# Altium footprint library AD.PcbLib: 13 footprints
Each footprint in its own frame and in the unit in brackets; x right, y up, seen from the top. Pads: shape width x height; smd on the part's side, far side on the other; paste and mask are expansions set on the pad; w line width, h text height; cw(c..) or ccw(c..) is an arc to the next point about the centre after c.
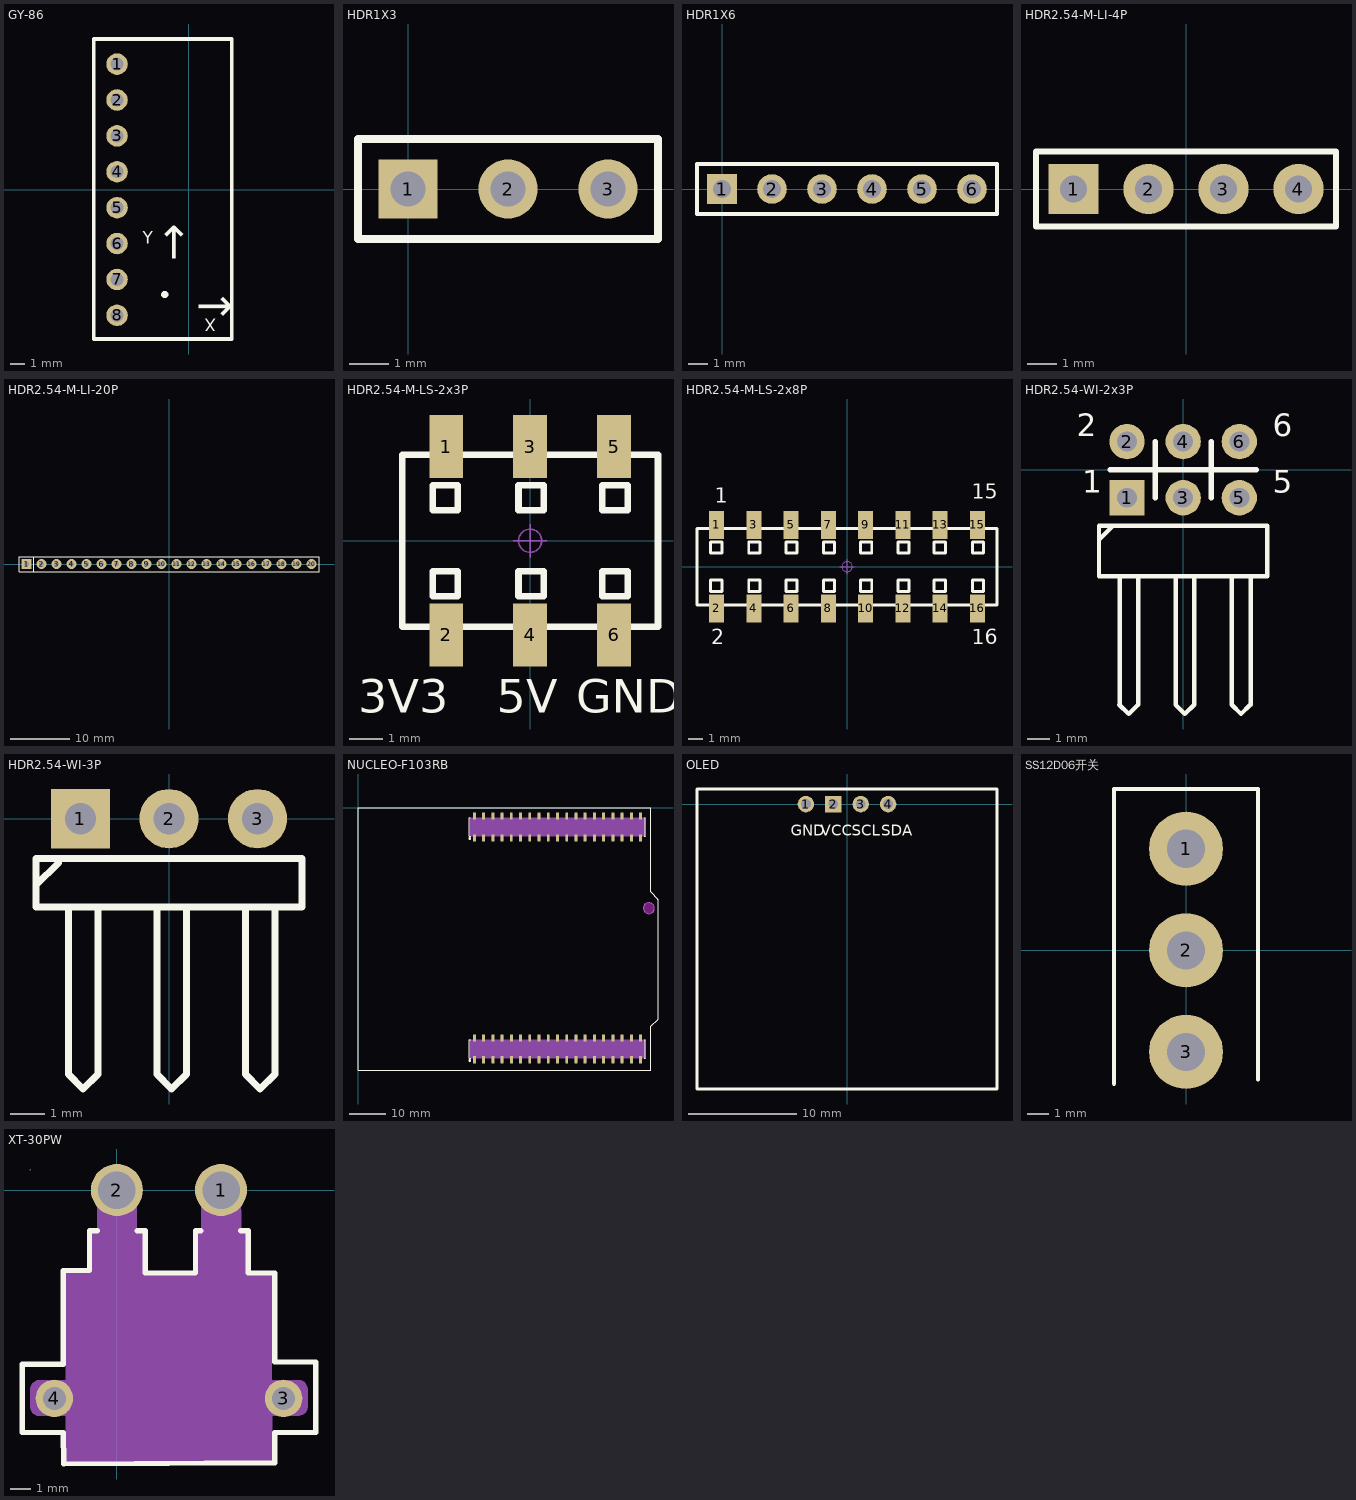
[diagram p0: the footprints below, top view; thin cyan lines are the x and y axes]

## GY-86 [mil]
pads (8):
  round 60 hole 36: 1(-200,350) 2(-200,250) 3(-200,150) 4(-200,50) 5(-200,-50) 6(-200,-150) 7(-200,-250) 8(-200,-350)
Top Overlay:
  circle w10: c-67,-292 r5
  lines w10: -265,-415.98 120,-415.98 120,420 -265,420 -265,-415.98
  text "↑" at -2.95,-273.22 h157.48
  text "X" at 77.05,-347 h59.05
  text "↑" at -92.95,-223.22 h157.48
  text "Y" at -127.95,-163.22 h59.05

## HDR1X3 [mm] "Connector; Header; 3 Position"
pads (3):
  rect 1.5x1.5 hole 0.9: 1(0,0)
  round 1.5 hole 0.9: 2(2.54,0) 3(5.08,0)
Top Overlay:
  lines w0.2: -1.27,-1.27 6.35,-1.27 6.35,1.27 -1.27,1.27 -1.27,-1.27
3D body "HDR2.54-1P_M.STEP": height 8.5, standoff -3, extent 3.81,-1.27 6.35,1.27
3D body "HDR2.54-1P_M.STEP": height 8.5, standoff -3, extent 1.27,-1.27 3.81,1.27
3D body "HDR2.54-1P_M.STEP": height 8.5, standoff -3, extent -1.27,-1.27 1.27,1.27

## HDR1X6 [mm] "Connector; Header; 6 Position"
pads (6):
  rect 1.5x1.5 hole 0.9: 1(0,0)
  round 1.5 hole 0.9: 2(2.54,0) 3(5.08,0) 4(7.62,0) 5(10.16,0) 6(12.7,0)
Top Overlay:
  lines w0.2: -1.27,-1.27 -1.27,1.27 13.97,1.27 13.97,-1.27 -1.27,-1.27
3D body "HDR2.54-1P_M.STEP": height 8.5, standoff -3, extent 11.43,-1.27 13.97,1.27
3D body "HDR2.54-1P_M.STEP": height 8.5, standoff -3, extent 8.89,-1.27 11.43,1.27
3D body "HDR2.54-1P_M.STEP": height 8.5, standoff -3, extent 6.35,-1.27 8.89,1.27
3D body "HDR2.54-1P_M.STEP": height 8.5, standoff -3, extent 3.81,-1.27 6.35,1.27
3D body "HDR2.54-1P_M.STEP": height 8.5, standoff -3, extent 1.27,-1.27 3.81,1.27
3D body "HDR2.54-1P_M.STEP": height 8.5, standoff -3, extent -1.27,-1.27 1.27,1.27

## HDR2.54-M-LI-4P [mm] "排母，4脚"
pads (4):
  rect 1.7x1.7 hole 0.9: 1(-3.81,0)
  round 1.7 hole 0.9: 2(-1.27,0) 3(1.27,0) 4(3.81,0)
Top Overlay:
  lines w0.2: -5.08,-1.27 5.08,-1.27 5.08,1.27 -5.08,1.27 -5.08,-1.27
3D body "HDR2.54-1P_M.STEP": height 8.5, standoff -3, extent 0,-1.27 2.54,1.27
3D body "HDR2.54-1P_M.STEP": height 8.5, standoff -3, extent 2.54,-1.27 5.08,1.27
3D body "HDR2.54-1P_M.STEP": height 8.5, standoff -3, extent -2.54,-1.27 0,1.27
3D body "HDR2.54-1P_M.STEP": height 8.5, standoff -3, extent -5.08,-1.27 -2.54,1.27

## HDR2.54-M-LI-20P [mm] "排母，20脚"
pads (20):
  rect 1.7x1.7 hole 0.9: 1(-24.13,0)
  round 1.7 hole 0.9: 2(-21.59,0) 3(-19.05,0) 4(-16.51,0) 5(-13.97,0) 6(-11.43,0) 7(-8.89,0) 8(-6.35,0) 9(-3.81,0) 10(-1.27,0) 11(1.27,0) 12(3.81,0) 13(6.35,0) 14(8.89,0) 15(11.43,0) 16(13.97,0)
  round 1.7 hole 0.762: 17(16.51,0) 18(19.05,0) 19(21.59,0) 20(24.13,0)
Top Overlay:
  lines w0.2: -22.88,-1.25 -22.88,1.25 ; -25.4,-1.27 -25.4,1.27 -23.495,1.27 25.4,1.27 25.4,-1.27 -25.4,-1.27
3D body "HDR2.54-1P_M.STEP": height 8.5, standoff -3, extent 12.7,-1.27 15.24,1.27
3D body "HDR2.54-1P_M.STEP": height 8.5, standoff -3, extent 15.24,-1.27 17.78,1.27
3D body "HDR2.54-1P_M.STEP": height 8.5, standoff -3, extent 17.78,-1.27 20.32,1.27
3D body "HDR2.54-1P_M.STEP": height 8.5, standoff -3, extent 20.32,-1.27 22.86,1.27
3D body "HDR2.54-1P_M.STEP": height 8.5, standoff -3, extent 22.86,-1.27 25.4,1.27
3D body "HDR2.54-1P_M.STEP": height 8.5, standoff -3, extent 0,-1.27 2.54,1.27
3D body "HDR2.54-1P_M.STEP": height 8.5, standoff -3, extent 2.54,-1.27 5.08,1.27
3D body "HDR2.54-1P_M.STEP": height 8.5, standoff -3, extent 5.08,-1.27 7.62,1.27
3D body "HDR2.54-1P_M.STEP": height 8.5, standoff -3, extent 7.62,-1.27 10.16,1.27
3D body "HDR2.54-1P_M.STEP": height 8.5, standoff -3, extent 10.16,-1.27 12.7,1.27
3D body "HDR2.54-1P_M.STEP": height 8.5, standoff -3, extent -12.7,-1.27 -10.16,1.27
3D body "HDR2.54-1P_M.STEP": height 8.5, standoff -3, extent -10.16,-1.27 -7.62,1.27
3D body "HDR2.54-1P_M.STEP": height 8.5, standoff -3, extent -7.62,-1.27 -5.08,1.27
3D body "HDR2.54-1P_M.STEP": height 8.5, standoff -3, extent -5.08,-1.27 -2.54,1.27
3D body "HDR2.54-1P_M.STEP": height 8.5, standoff -3, extent -2.54,-1.27 0,1.27
3D body "HDR2.54-1P_M.STEP": height 8.5, standoff -3, extent -25.4,-1.27 -22.86,1.27
3D body "HDR2.54-1P_M.STEP": height 8.5, standoff -3, extent -22.86,-1.27 -20.32,1.27
3D body "HDR2.54-1P_M.STEP": height 8.5, standoff -3, extent -20.32,-1.27 -17.78,1.27
3D body "HDR2.54-1P_M.STEP": height 8.5, standoff -3, extent -17.78,-1.27 -15.24,1.27
3D body "HDR2.54-1P_M.STEP": height 8.5, standoff -3, extent -15.24,-1.27 -12.7,1.27

## HDR2.54-M-LS-2x3P [mm] "脚距：2.54mm，贴片双排母"
pads (6):
  rect 1.02x1.9 smd: 1(-2.54,2.85) 2(-2.54,-2.85) 3(0,2.85) 4(0,-2.85) 5(2.54,2.85) 6(2.54,-2.85)
Top Overlay:
  lines w0.2: -3.87,-2.6 -3.87,2.6 3.87,2.6 3.87,-2.6 -3.87,-2.6 ; -2.951,-1.681 -2.951,-0.919 -2.189,-0.919 -2.189,-1.681 -2.951,-1.681 ; -2.951,0.919 -2.951,1.681 -2.189,1.681 -2.189,0.919 -2.951,0.919 ; -0.351,-1.681 -0.351,-0.919 0.411,-0.919 0.411,-1.681 -0.351,-1.681 ; -0.351,0.919 -0.351,1.681 0.411,1.681 0.411,0.919 -0.351,0.919 ; 2.189,-1.681 2.951,-1.681 2.951,-0.919 2.189,-0.919 2.189,-1.681 ; 2.189,0.919 2.951,0.919 2.951,1.681 2.189,1.681 2.189,0.919
  text "GND" at 1.397,-5.207 h1.02
  text "3V3" at -5.207,-5.207 h1.02
  text "5V" at -1.016,-5.207 h1.02
Top Courtyard:
  circle w0.05: c0,0 r0.35
  lines w0.05: -0.5,0 0.5,0 ; 0,-0.5 0,0.5
3D body "HDR2.54 2x1P_M.STEP": height 5.15, standoff 0, extent 1.24,-3.2 3.84,3.2
3D body "HDR2.54 2x1P_M.STEP": height 5.15, standoff 0, extent -1.3,-3.2 1.3,3.2
3D body "HDR2.54 2x1P_M.STEP": height 5.15, standoff 0, extent -3.84,-3.2 -1.24,3.2

## HDR2.54-M-LS-2x8P [mm] "脚距：2.54mm，贴片双排母"
pads (16):
  rect 1.02x1.9 smd: 1(-8.89,2.85) 2(-8.89,-2.85) 3(-6.35,2.85) 4(-6.35,-2.85) 5(-3.81,2.85) 6(-3.81,-2.85) 7(-1.27,2.85) 8(-1.27,-2.85) 9(1.27,2.85) 10(1.27,-2.85) 11(3.81,2.85) 12(3.81,-2.85) 13(6.35,2.85) 14(6.35,-2.85) 15(8.89,2.85) 16(8.89,-2.85)
Top Overlay:
  lines w0.2: -10.23,-2.6 10.22,-2.6 10.22,2.6 -10.23,2.6 -10.23,-2.6 ; -9.301,-1.681 -8.539,-1.681 -8.539,-0.919 -9.301,-0.919 -9.301,-1.681 ; -9.301,0.919 -8.539,0.919 -8.539,1.681 -9.301,1.681 -9.301,0.919 ; -6.701,-1.681 -5.939,-1.681 -5.939,-0.919 -6.701,-0.919 -6.701,-1.681 ; -6.701,0.919 -5.939,0.919 -5.939,1.681 -6.701,1.681 -6.701,0.919 ; -4.161,-1.681 -4.161,-0.919 -3.399,-0.919 -3.399,-1.681 -4.161,-1.681 ; -4.161,0.919 -4.161,1.681 -3.399,1.681 -3.399,0.919 -4.161,0.919 ; -1.621,-1.681 -0.859,-1.681 -0.859,-0.919 -1.621,-0.919 -1.621,-1.681 ; -1.621,0.919 -0.859,0.919 -0.859,1.681 -1.621,1.681 -1.621,0.919 ; 0.919,-1.681 1.681,-1.681 1.681,-0.919 0.919,-0.919 0.919,-1.681 ; 0.919,0.919 1.681,0.919 1.681,1.681 0.919,1.681 0.919,0.919 ; 3.459,-1.681 4.221,-1.681 4.221,-0.919 3.459,-0.919 3.459,-1.681 ; 3.459,0.919 4.221,0.919 4.221,1.681 3.459,1.681 3.459,0.919 ; 5.939,-1.681 5.939,-0.919 6.701,-0.919 6.701,-1.681 5.939,-1.681 ; 5.939,0.919 5.939,1.681 6.701,1.681 6.701,0.919 5.939,0.919 ; 8.539,-1.681 8.539,-0.919 9.301,-0.919 9.301,-1.681 8.539,-1.681 ; 8.539,0.919 8.539,1.681 9.301,1.681 9.301,0.919 8.539,0.919
  text "2" at -9.271,-5.278 h1.02
  text "1" at -9.017,4.374 h1.02
  text "15" at 8.509,4.628 h1.02
  text "16" at 8.509,-5.278 h1.02
Top Courtyard:
  circle w0.05: c0,0 r0.35
  lines w0.05: -0.5,0 0.5,0 ; 0,-0.5 0,0.5
3D body "HDR2.54 2x1P_M.STEP": height 5.15, standoff 0, extent 7.59,-3.2 10.19,3.2
3D body "HDR2.54 2x1P_M.STEP": height 5.15, standoff 0, extent 5.05,-3.2 7.65,3.2
3D body "HDR2.54 2x1P_M.STEP": height 5.15, standoff 0, extent 2.51,-3.2 5.11,3.2
3D body "HDR2.54 2x1P_M.STEP": height 5.15, standoff 0, extent -0.03,-3.2 2.57,3.2
3D body "HDR2.54 2x1P_M.STEP": height 5.15, standoff 0, extent -2.57,-3.2 0.03,3.2
3D body "HDR2.54 2x1P_M.STEP": height 5.15, standoff 0, extent -10.19,-3.2 -7.59,3.2
3D body "HDR2.54 2x1P_M.STEP": height 5.15, standoff 0, extent -7.65,-3.2 -5.05,3.2
3D body "HDR2.54 2x1P_M.STEP": height 5.15, standoff 0, extent -5.11,-3.2 -2.51,3.2

## HDR2.54-WI-2x3P [mm] "双排弯脚排针，3x2脚"
pads (6):
  rect 1.6x1.6 hole 0.9: 1(-2.54,-1.27)
  round 1.6 hole 0.9: 2(-2.54,1.27) 3(0,-1.27) 4(0,1.27) 5(2.54,-1.27) 6(2.54,1.27)
Top Overlay:
  lines w0.2: -3.81,-3.175 -3.175,-2.54 ; -2.888,-10.634 -2.465,-11.057 -2.041,-10.634 -2.032,-10.625 -2.032,-4.826 ; -2.879,-10.634 -2.879,-4.826 ; -0.348,-10.634 0.075,-11.057 0.499,-10.634 ; -0.339,-10.634 -0.339,-4.826 ; 0.508,-10.634 0.508,-4.826 ; 2.192,-10.634 2.615,-11.057 3.039,-10.634 ; 2.201,-10.634 2.201,-4.826 ; 3.048,-10.634 3.048,-4.826 ; -3.81,-4.826 -3.81,-2.54 3.81,-2.54 3.81,-4.826 -3.81,-4.826
  lines w0.254: -3.302,0 3.302,0 ; -1.27,-1.27 -1.27,1.27 ; 1.27,-1.27 1.27,1.27
  text "1" at -4.572,-1.037 h1.02
  text "2" at -4.826,1.503 h1.02
  text "5" at 4.064,-1.037 h1.02
  text "6" at 4.064,1.503 h1.02
Bottom Overlay:
  lines w0.254: -3.302,0 3.302,0 ; -1.27,-1.27 -1.27,1.27 ; 1.27,-1.27 1.27,1.27
3D body "HDR-1x2_H.STEP": height 5.1, standoff -3, extent 1.27,-10.489 3.81,2.361
3D body "HDR-1x2_H.STEP": height 5.1, standoff -3, extent -3.81,-10.489 -1.27,2.361
3D body "HDR-1x2_H.STEP": height 5.1, standoff -3, extent -1.27,-10.489 1.27,2.361

## HDR2.54-WI-3P [mm] "弯脚排针，3脚"
pads (3):
  rect 1.7x1.7 hole 0.9: 1(-2.54,0)
  round 1.7 hole 0.9: 2(0,0) 3(2.54,0)
Top Overlay:
  lines w0.2: -3.81,-1.905 -3.175,-1.27 ; -2.888,-2.54 -2.888,-7.332 -2.465,-7.755 -2.041,-7.332 -2.032,-7.323 ; -2.041,-7.323 -2.041,-2.54 ; -0.348,-2.54 -0.348,-7.332 0.075,-7.755 0.499,-7.332 ; 0.499,-7.323 0.499,-2.54 ; 2.192,-2.54 2.192,-7.332 2.615,-7.755 3.039,-7.332 ; 3.039,-7.323 3.039,-2.54 ; -3.81,-2.54 3.81,-2.54 3.81,-1.143 -2.032,-1.143 -3.81,-1.143 -3.81,-2.54
3D body "HDR2.54-1P_H.STEP": height 4.85, standoff -3, extent -3.81,-7.77 -1.27,1.27
3D body "HDR2.54-1P_H.STEP": height 4.85, standoff -3, extent -1.27,-7.77 1.27,1.27
3D body "HDR2.54-1P_H.STEP": height 4.85, standoff -3, extent 1.27,-7.77 3.81,1.27

## NUCLEO-F103RB [mm]
pads (76):
  rect 0.8x2 smd paste+0 mask+0.051: 1(32,-69.308) 2(32,-63.308) 3(34.54,-69.308) 4(34.54,-63.308) 5(37.08,-69.308) 6(37.08,-63.308) 7(39.62,-69.308) 8(39.62,-63.308) 9(42.16,-69.308) 10(42.16,-63.308) 11(44.7,-69.308) 12(44.7,-63.308) 13(47.24,-69.308) 14(47.24,-63.308) 15(49.78,-69.308) 16(49.78,-63.308) 17(52.32,-69.308) 18(52.32,-63.308) 19(54.86,-69.308) 20(54.86,-63.308) 21(57.4,-69.308) 22(57.4,-63.308) 23(59.94,-69.308) 24(59.94,-63.308) 25(62.48,-69.308) 26(62.48,-63.308) 27(65.02,-69.308) 28(65.02,-63.308) 29(67.56,-69.308) 30(67.56,-63.308) 31(70.1,-69.308) 32(70.1,-63.308) 33(72.64,-69.308) 34(72.64,-63.308) 35(75.18,-69.308) 36(75.18,-63.308) 37(77.72,-69.308) 38(77.72,-63.308) 73(31.995,-8.282) 74(31.995,-2.282) 75(34.535,-8.282) 76(34.535,-2.282) 77(37.075,-8.282) 78(37.075,-2.282) 79(39.615,-8.282) 80(39.615,-2.282) 81(42.155,-8.282) 82(42.155,-2.282) 83(44.695,-8.282) 84(44.695,-2.282) 85(47.235,-8.282) 86(47.235,-2.282) 87(49.775,-8.282) 88(49.775,-2.282) 89(52.315,-8.282) 90(52.315,-2.282) 91(54.855,-8.282) 92(54.855,-2.282) 93(57.395,-8.282) 94(57.395,-2.282) 95(59.935,-8.282) 96(59.935,-2.282) 97(62.475,-8.282) 98(62.475,-2.282) 99(65.015,-8.282) 100(65.015,-2.282) 101(67.555,-8.282) 102(67.555,-2.282) 103(70.095,-8.282) 104(70.095,-2.282) 105(72.635,-8.282) 106(72.635,-2.282) 107(75.175,-8.282) 108(75.175,-2.282) 109(77.715,-8.282) 110(77.715,-2.282)
Top Overlay:
  circle w0.254: c30.73,-69.483 r0.231
  circle w0.254: c30.725,-8.457 r0.231
  lines w0.254: 30.918,-2.782 30.655,-2.782 30.655,-7.782 30.943,-7.782 ; 30.963,-63.808 30.66,-63.808 30.66,-68.808 30.988,-68.808 ; 78.664,-68.808 78.96,-68.808 78.96,-63.808 78.689,-63.808 ; 78.72,-7.782 78.955,-7.782 78.955,-2.782 78.72,-2.782 ; 82.5,-25.108 82.5,-25.308 82.5,-25.108 ; 82.5,-25.108 80.5,-23.108 80.5,-0.051 0,-0.051 0,-72.108 80.5,-72.108 80.5,-60.108 82.5,-58.108 82.5,-25.108
Keep-Out Layer:
  board cut-out: 81.5,-27.608 81.5,-27.756 81.442,-28.046 81.329,-28.319 81.165,-28.564 80.956,-28.773 80.71,-28.938 80.437,-29.051 80.148,-29.108 79.852,-29.108 79.562,-29.051 79.289,-28.938 79.044,-28.773 78.835,-28.564 78.671,-28.319 78.557,-28.046 78.5,-27.756 78.5,-27.608 78.5,-27.461 78.557,-27.171 78.671,-26.898 78.835,-26.652 79.044,-26.443 79.289,-26.279 79.562,-26.166 79.852,-26.108 80.148,-26.108 80.437,-26.166 80.71,-26.279 80.956,-26.443 81.165,-26.652 81.329,-26.898 81.442,-27.171 81.5,-27.461 81.5,-27.608
Keep-Out Layer:
  circle w0.003: c80,-27.608 r1.5
  region: 81.5,-27.608 81.49,-27.782 81.459,-27.954 81.409,-28.121 81.34,-28.281 81.253,-28.433 81.149,-28.572 81.029,-28.699 80.896,-28.811 80.75,-28.907 80.594,-28.986 80.43,-29.045 80.26,-29.085 80.087,-29.106 79.913,-29.106 79.739,-29.085 79.57,-29.045 79.406,-28.986 79.25,-28.907 79.104,-28.811 78.97,-28.699 78.851,-28.572 78.747,-28.433 78.659,-28.281 78.59,-28.121 78.54,-27.954 78.51,-27.782 78.5,-27.608 78.51,-27.434 78.54,-27.262 78.59,-27.095 78.659,-26.935 78.747,-26.784 78.851,-26.644 78.97,-26.517 79.104,-26.405 79.25,-26.309 79.406,-26.231 79.57,-26.171 79.739,-26.131 79.913,-26.111 80.087,-26.111 80.26,-26.131 80.43,-26.171 80.594,-26.231 80.75,-26.309 80.896,-26.405 81.029,-26.517 81.149,-26.644 81.253,-26.784 81.34,-26.935 81.409,-27.095 81.459,-27.262 81.49,-27.434
  region: 81.5,-27.608 81.5,-27.756 81.442,-28.046 81.329,-28.319 81.165,-28.564 80.956,-28.773 80.71,-28.938 80.437,-29.051 80.148,-29.108 79.852,-29.108 79.562,-29.051 79.289,-28.938 79.044,-28.773 78.835,-28.564 78.671,-28.319 78.557,-28.046 78.5,-27.756 78.5,-27.608 78.5,-27.461 78.557,-27.171 78.671,-26.898 78.835,-26.652 79.044,-26.443 79.289,-26.279 79.562,-26.166 79.852,-26.108 80.148,-26.108 80.437,-26.166 80.71,-26.279 80.956,-26.443 81.165,-26.652 81.329,-26.898 81.442,-27.171 81.5,-27.461 81.5,-27.608
Mechanical 1:
  circle w0.003: c80,-27.608 r1.5
Mechanical 7:
  region: 30.73,-68.808 30.73,-63.808 78.99,-63.808 78.99,-68.808
  region: 30.725,-7.782 30.725,-2.782 78.985,-2.782 78.985,-7.782
Mechanical 8:
  region: 30.76,-69.878 30.76,-69.89 30.742,-69.908 30.718,-69.908 30.7,-69.89 30.7,-69.878 30.7,-69.866 30.718,-69.848 30.742,-69.848 30.76,-69.866 30.76,-69.878
Top Assembly:
  drawing of 95 lines, arcs and shapes, not listed

## OLED [mil]
pads (4):
  round 60 hole 35.98: 1(-150,0) 3(50,0) 4(150,0)
  rect 60x60 hole 35.98: 2(-50,0)
Top Overlay:
  lines w10: -547.24,-1039.37 547.24,-1039.37 547.24,55.12 -547.24,55.12 -547.24,-1039.37
  text "SDA" at 125,-115.9 h39.37
  text "SCL" at 17.87,-115.9 h39.37
  text "VCC" at -95.37,-115.9 h39.37
  text "GND" at -205,-115.9 h39.37

## SS12D06开关 [mm]
pads (3):
  round 3.5 hole 1.8 paste-2539.97 mask+0.102: 1(0,4.8) 2(0,0) 3(0,-4.8)
Top Overlay:
  lines w0.2: -3.4,-6.299 -3.4,7.62 3.4,7.62 3.4,-6.096

## XT-30PW [mm]
pads (4):
  round 2.5 hole 1.8 paste-2539.97 mask+0.051: 1(5,0) 2(0,0)
  round 1.8 hole 1.1 paste-2539.97 mask+0.051: 3(8,-10) 4(-3,-10)
Top Overlay:
  lines w0.254: -0.929,-1.952 -1.31,-1.952 -1.31,-3.857 -2.58,-3.857 -2.58,-4.953 -2.58,-8.357 -4.547,-8.357 -4.547,-11.633 -2.577,-11.633 -2.55,-13.15 7.58,-13.091 7.58,-11.633 9.55,-11.633 9.55,-8.255 7.58,-8.255 7.58,-4.953 7.58,-3.984 6.31,-3.984 6.31,-1.952 5.929,-1.952 ; 0.976,-1.952 1.357,-1.952 1.357,-3.984 3.77,-3.984 3.77,-1.952 4.024,-1.952
Mechanical 7:
  region: -0.805,0.543 -0.687,0.665 -0.584,0.774 -0.447,0.858 -0.31,0.919 -0.165,0.963 0.011,0.97 0.152,0.959 0.305,0.919 0.454,0.856 0.586,0.769 0.697,0.66 0.805,0.535 0.873,0.391 0.92,0.246 0.952,0.098 0.95,-1.981 1.251,-1.981 1.25,-3.982 3.756,-3.979 3.751,-1.981 4.053,-1.978 4.048,0.092 4.08,0.255 4.131,0.405 4.202,0.543 4.299,0.659 4.421,0.772 4.552,0.859 4.682,0.919 4.838,0.96 4.989,0.971 5.16,0.961 5.315,0.917 5.447,0.861 5.577,0.769 5.706,0.656 5.8,0.54 5.867,0.403 5.919,0.257 5.952,0.104 5.959,-1.978 6.24,-1.982 6.252,-3.983 7.45,-3.977 7.441,-9.132 8.843,-9.139 8.948,-9.176 8.992,-9.214 9.07,-9.298 9.144,-9.43 9.158,-9.549 9.151,-10.419 9.143,-10.51 9.111,-10.601 9.054,-10.686 8.993,-10.75 8.915,-10.793 8.833,-10.82 8.75,-10.833 7.448,-10.832 7.453,-13.047 -2.44,-13.05 -2.454,-10.826 -3.751,-10.83 -3.845,-10.823 -3.929,-10.788 -4.007,-10.736 -4.065,-10.683 -4.114,-10.592 -4.141,-10.518 -4.148,-10.44 -4.154,-9.515 -4.138,-9.442 -4.11,-9.358 -4.061,-9.275 -4.001,-9.217 -3.914,-9.166 -3.835,-9.135 -2.448,-9.129 -2.455,-3.975 -1.241,-3.98 -1.248,-1.98 -0.951,-1.983 -0.951,0.092 -0.92,0.253 -0.871,0.397 -0.851,0.436 -0.851,0.437
Mechanical 8:
  region: -4.124,0.971 -4.124,0.959 -4.142,0.941 -4.166,0.941 -4.184,0.959 -4.184,0.971 -4.184,0.984 -4.166,1.001 -4.142,1.001 -4.124,0.984 -4.124,0.971
Bottom Assembly:
  region: 8.187,-10 8.187,-10.037 8.159,-10.106 8.106,-10.159 8.037,-10.187 7.963,-10.187 7.894,-10.159 7.841,-10.106 7.813,-10.037 7.813,-10 7.813,-9.963 7.841,-9.894 7.894,-9.841 7.963,-9.813 8.037,-9.813 8.106,-9.841 8.159,-9.894 8.187,-9.963 8.187,-10
  region: -2.813,-10 -2.813,-10.037 -2.841,-10.106 -2.894,-10.159 -2.963,-10.187 -3.037,-10.187 -3.106,-10.159 -3.159,-10.106 -3.187,-10.037 -3.187,-10 -3.187,-9.963 -3.159,-9.894 -3.106,-9.841 -3.037,-9.813 -2.963,-9.813 -2.894,-9.841 -2.841,-9.894 -2.813,-9.963 -2.813,-10
  region: 5.325,0 5.325,-0.065 5.276,-0.184 5.184,-0.276 5.065,-0.325 4.935,-0.325 4.816,-0.276 4.724,-0.184 4.675,-0.065 4.675,0 4.675,0.065 4.724,0.184 4.816,0.276 4.935,0.325 5.065,0.325 5.184,0.276 5.276,0.184 5.325,0.065 5.325,0
  region: 0.325,0 0.325,-0.065 0.276,-0.184 0.184,-0.276 0.065,-0.325 -0.065,-0.325 -0.184,-0.276 -0.276,-0.184 -0.325,-0.065 -0.325,0 -0.325,0.065 -0.276,0.184 -0.184,0.276 -0.065,0.325 0.065,0.325 0.184,0.276 0.276,0.184 0.325,0.065 0.325,0